# EAGLE library part NUCLEO-64 (library xport-v92-faxcard)
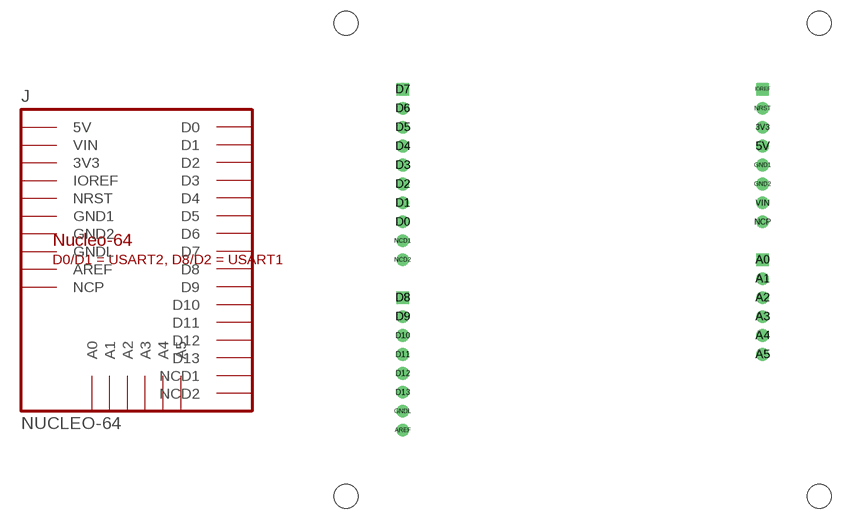
[diagram p1: symbol with the pads of NUCLEO64; footprint NUCLEO64]

Designator prefix J

## NUCLEO-64  [NUCLEO64]
3V3  3V3
5V  5V
A0  A0
A1  A1
A2  A2
A3  A3
A4  A4
A5  A5
AREF  AREF
D0  D0
D1  D1
D2  D2
D3  D3
D4  D4
D5  D5
D6  D6
D7  D7
D8  D8
D9  D9
D10  D10
D11  D11
D12  D12
D13  D13
GND1  GND1
GND2  GND2
GNDL  GNDL
IOREF  IOREF
NCD1  NCD1
NCD2  NCD2
NCP  NCP
NRST  NRST
VIN  VIN

## Footprint NUCLEO64 (pad centres in mm)
STM32 Nucleo-64 socketed on four 2.54 mm single rows (Arduino Uno R3 signals) + 4 x M3
drill 1 pad 1.7: 3V3 24.13,17.78; 5V 24.13,15.24; A1 24.13,-2.54; A2 24.13,-5.08; A3 24.13,-7.62; A4 24.13,-10.16; A5 24.13,-12.7; AREF -24.13,-22.86; D0 -24.13,5.08; D1 -24.13,7.62; D2 -24.13,10.16; D3 -24.13,12.7; D4 -24.13,15.24; D5 -24.13,17.78; D6 -24.13,20.32; D9 -24.13,-7.62; D10 -24.13,-10.16; D11 -24.13,-12.7; D12 -24.13,-15.24; D13 -24.13,-17.78; GND1 24.13,12.7; GND2 24.13,10.16; GNDL -24.13,-20.32; NCD1 -24.13,2.54; NCD2 -24.13,0; NCP 24.13,5.08; NRST 24.13,20.32; VIN 24.13,7.62
drill 1 pad 1.7 square: A0 24.13,0; D7 -24.13,22.86; D8 -24.13,-5.08; IOREF 24.13,22.86
hole 3.2 at -31.75,31.75
hole 3.2 at 31.75,31.75
hole 3.2 at -31.75,-31.75
hole 3.2 at 31.75,-31.75